# Altium footprint library Eduard.PcbLib: 54 footprints (part 4 of 4)
Each footprint in its own frame and in the unit in brackets; x right, y up, seen from the top. Pads: shape width x height; smd on the part's side, far side on the other; paste and mask are expansions set on the pad; w line width, h text height; cw(c..) or ccw(c..) is an arc to the next point about the centre after c.
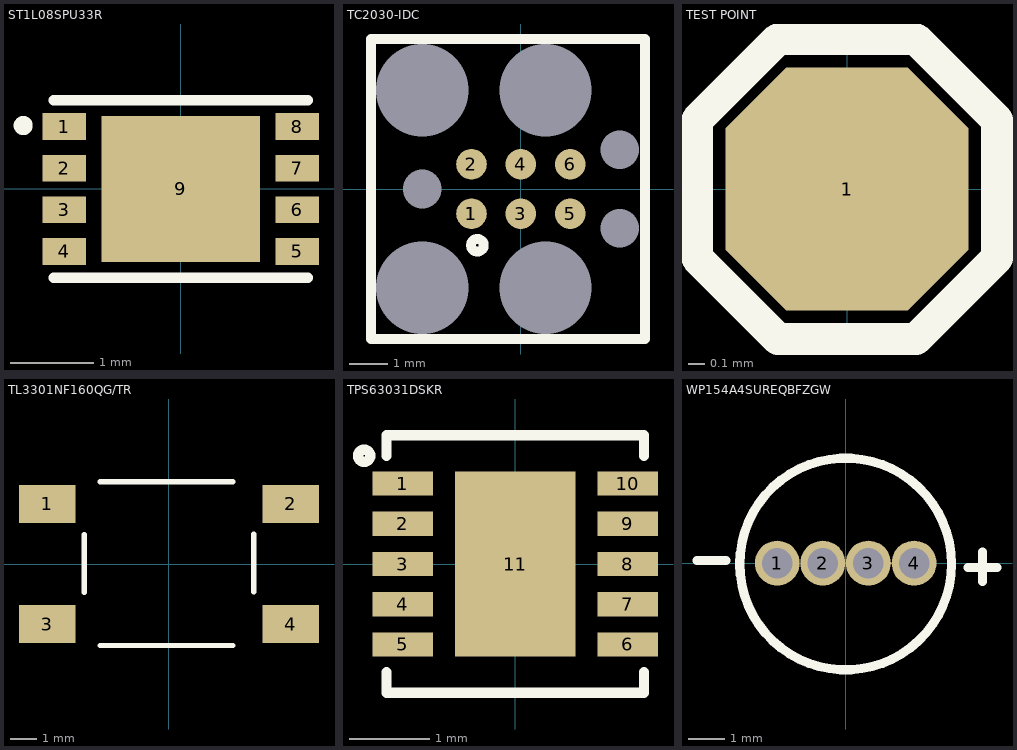
[diagram p3: the footprints below, top view; thin cyan lines are the x and y axes]

## ST1L08SPU33R [mm]
pads (9):
  rect 0.52x0.32 smd: 1(-1.4,0.75) 2(-1.4,0.25) 3(-1.4,-0.25) 4(-1.4,-0.75) 5(1.4,-0.75) 6(1.4,-0.25) 7(1.4,0.25) 8(1.4,0.75)
  rect 1.9x1.75 smd: 9(0,0)
Top Overlay:
  circle w0.127: c-1.892,0.762 r0.051
  lines w0.127: -1.524,-1.067 1.524,-1.067 ; -1.524,1.067 1.524,1.067
3D body "User Library-DFN-8-2.step": height 0.8, standoff -0.1, extent -1.528,-1.006 1.512,0.994

## TC2030-IDC [mm] "CABLE ADAPTER 6 POS"
pads (14):
  round 0.787 smd: 1(-1.27,-0.635) 1(-1.27,-0.635) 2(-1.27,0.635) 3(0,-0.635) 4(0,0.635) 5(1.27,-0.635) 6(1.27,0.635)
  round 0 hole 2.375: MP1(-2.54,-2.54) MP2(0.635,-2.54) MP3(0.635,2.54) MP4(-2.54,2.54)
  round 0 hole 0.991: MP5(-2.54,0) MP6(2.54,-1.016) MP7(2.54,1.016)
Top Overlay:
  circle w0.254: c-1.118,-1.448 r0.163
  lines w0.254: -3.861,-3.861 3.2,-3.861 3.2,3.861 -3.861,3.861 -3.861,-3.861

## TEST POINT [mil]
pads (1):
  oct 60x60 smd: 1(0,0)
Top Overlay:
  lines w7.87: -17,-37 17,-37 ; -17,-37 -37,-17 -37,17 -17,37 ; -17,-37 17,-37 ; -17,37 17,37 ; -17,37 17,37 ; 17,-37 37,-17 37,17 17,37

## TL3301NF160QG/TR [mm] "Tactile Switch SPST-NO Top Actuated Surface Mount"
pads (4):
  rect 2.12x1.42 smd: 1(-4.55,2.25) 2(4.55,2.25) 3(-4.55,-2.25) 4(4.55,-2.25)
Top Overlay:
  lines w0.2: -3.175,-1.067 -3.175,1.092 ; -2.565,-3.048 2.388,-3.048 ; -2.565,3.073 2.388,3.073 ; 3.175,-1.041 3.175,1.118
3D body "TL3301NFxxxxG.stp": height 4.41, standoff 0.01, extent -5,-3 5,3

## TPS63031DSKR [mm] "Conv DC-DC 1.8V to 5.5V Non-Inv/Inv/Step Up/Step Down Single-Out 3.3V 0.8A 10-Pin WSON"
pads (11):
  rect 0.75x0.3 smd: 1(-1.4,1) 2(-1.4,0.5) 3(-1.4,0) 4(-1.4,-0.5) 5(-1.4,-1) 6(1.4,-1) 7(1.4,-0.5) 8(1.4,0) 9(1.4,0.5) 10(1.4,1)
  rect 1.5x2.3 smd: 11(0,0)
Top Overlay:
  circle w0.127: c-1.88,1.346 r0.076
  lines w0.127: -1.6,-1.346 -1.6,-1.6 1.6,-1.6 1.6,-1.346 ; -1.6,1.346 -1.6,1.6 1.6,1.6 1.6,1.346
3D body "User Library-My-DFN-10-3x3-0_5.STEP": height 0.8, standoff 0, extent -1.56,-1.55 1.56,1.55

## WP154A4SUREQBFZGW [mm]
pads (4):
  round 1.25 hole 0.85: 1(-1.905,0) 2(-0.635,0) 3(0.635,0) 4(1.905,0)
Top Overlay:
  circle w0.254: c0,-0.025 r2.95
  lines w0.254: -4.14,0.076 -3.327,0.076 ; 3.404,-0.127 4.216,-0.127 ; 3.81,-0.508 3.81,0.305
3D body "WP154A4.STEP": height 8.8, standoff -24.3, extent -2.5,-2.95 2.95,2.95